# EAGLE library part PINHD-2X6 (library HansPinhead)
PIN HEADER
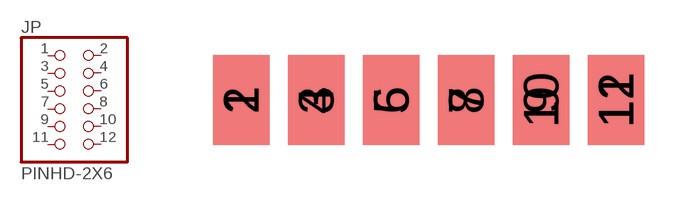
[diagram p30: symbol with the pads of 2X06; footprint 2X06]

Designator prefix JP

## PINHD-2X6  [2X06]
1  1  pas
2  2  pas
3  3  pas
4  4  pas
5  5  pas
6  6  pas
7  7  pas
8  8  pas
9  9  pas
10  10  pas
11  11  pas
12  12  pas

## Footprint 2X06 (pad centres in mm)
PIN HEADER
smd 1.905 x 3.048: 1 -6.35,-1.524; 3 -3.81,-1.524; 5 -1.27,-1.524; 7 1.27,-1.524; 9 3.81,-1.524; 11 6.35,-1.524
smd 1.905 x 3.048 bottom: 2 -6.35,-1.524; 4 -3.81,-1.524; 6 -1.27,-1.524; 8 1.27,-1.524; 10 3.81,-1.524; 12 6.35,-1.524